# Altium schematic symbol library AMS1117_1V2.SchLib: 1 symbol
Pins are listed as number, name and electrical type; pins without a type are passive.

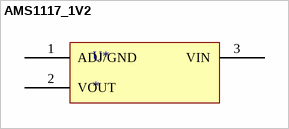
[diagram p0: symbol AMS1117_1V2]

## AMS1117_1V2
designator U*
AMS1117_1V2
footprint AMS1117_1V2
pins: 1 ADJ/GND, 2 VOUT, 3 VIN